# Altium schematic symbol library TIA_LT1793.SchLib: 12 symbols
Pins are listed as number, name and electrical type; pins without a type are passive.

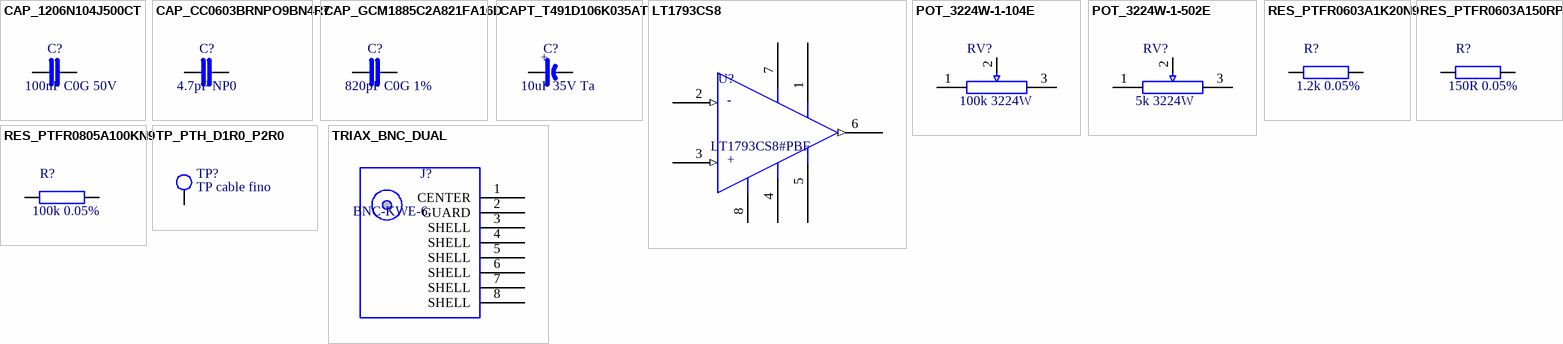
[diagram p0: symbols CAP_1206N104J500CT to TRIAX_BNC_DUAL]

## CAP_1206N104J500CT
designator C?, comment 100nF C0G 50V
Condensador 100 nF +-5 % C0G 50 V 1206 (C_HP1, C_HP2, C_DEC_*); Manufacturer: Walsin; Manufacturer Part Number: 1206N104J500CT; LCSC: C170182; Footprint Ref: C1206_IPC
footprint C1206_IPC (Footprint C1206_IPC (TIA_LT1793.PcbLib))
pins: 1, 2

## CAP_CC0603BRNPO9BN4R7
designator C?, comment 4.7pF NP0
Condensador 4.7 pF +-0.1 pF NP0 0603 (C_F); Manufacturer: YAGEO; Manufacturer Part Number: CC0603BRNPO9BN4R7; LCSC: C327022; Footprint Ref: C0603_IPC
footprint C0603_IPC (Footprint C0603_IPC (TIA_LT1793.PcbLib))
pins: 1, 2

## CAP_GCM1885C2A821FA16D
designator C?, comment 820pF C0G 1%
Condensador 820 pF +-1 % C0G 100 V 0603 (C_LP); Manufacturer: Murata; Manufacturer Part Number: GCM1885C2A821FA16D; LCSC: C1864286; Footprint Ref: C0603_IPC
footprint C0603_IPC (Footprint C0603_IPC (TIA_LT1793.PcbLib))
pins: 1, 2

## CAPT_T491D106K035AT
designator C?, comment 10uF 35V Ta
Condensador tantalo 10 uF 35 V caso D, polarizado: pin 1 = + (anodo); Manufacturer: KEMET; Manufacturer Part Number: T491D106K035AT; LCSC: C122299; Footprint Ref: CAPT_KEMET_D_7343-31
footprint CAPT_KEMET_D_7343-31 (Footprint CAPT_KEMET_D_7343-31 (TIA_LT1793.PcbLib))
pins: 1 +, 2 -

## LT1793CS8
designator U?, comment LT1793CS8#PBF
Amplificador operacional JFET bajo ruido LT1793, SO-8; Manufacturer: Analog Devices (Linear Technology); Manufacturer Part Number: LT1793CS8#PBF; LCSC: C665301; Footprint Ref: SOIC127P600X175-8N
footprint SOIC127P600X175-8N (Footprint SOIC127P600X175-8N (TIA_LT1793.PcbLib))
pins: 1 VOS, 2 -IN (in), 3 +IN (in), 4 V- (power), 5 VOS, 6 OUT (out), 7 V+ (power), 8 NC
text: -; +

## POT_3224W-1-104E
designator RV?, comment 100k 3224W
Trimmer 100 kOhm 12 vueltas Bourns 3224W (P_HP); Manufacturer Part Number: 3224W-1-104E; Pinout: 1=extremo CCW (senal), 2=cursor, 3=extremo CW (libre); Manufacturer: Bourns; LCSC: C53229; Footprint Ref: BOURNS_3224W
footprint BOURNS_3224W (Footprint BOURNS_3224W (TIA_LT1793.PcbLib))
pins: 1, 2 W, 3

## POT_3224W-1-502E
designator RV?, comment 5k 3224W
Trimmer 5 kOhm 12 vueltas Bourns 3224W (P_LP); Manufacturer Part Number: 3224W-1-502E; Pinout: 1=extremo CCW (senal), 2=cursor, 3=extremo CW (libre); Manufacturer: Bourns; LCSC: C81349; Footprint Ref: BOURNS_3224W
footprint BOURNS_3224W (Footprint BOURNS_3224W (TIA_LT1793.PcbLib))
pins: 1, 2 W, 3

## RES_PTFR0603A1K20N9
designator R?, comment 1.2k 0.05%
Resistencia 1.2 kOhm +-0.05 % 0603 (R_HP); Manufacturer: Resi; Manufacturer Part Number: PTFR0603A1K20N9; LCSC: C47115537; Footprint Ref: R0603_IPC
footprint R0603_IPC (Footprint R0603_IPC (TIA_LT1793.PcbLib))
pins: 1, 2

## RES_PTFR0603A150RP9
designator R?, comment 150R 0.05%
Resistencia 150 Ohm +-0.05 % 0603 (R_LP); Manufacturer: Resi; Manufacturer Part Number: PTFR0603A150RP9; LCSC: C19683979; Footprint Ref: R0603_IPC
footprint R0603_IPC (Footprint R0603_IPC (TIA_LT1793.PcbLib))
pins: 1, 2

## RES_PTFR0805A100KN9
designator R?, comment 100k 0.05%
Resistencia 100 kOhm +-0.05 % 0805 (R_F); Manufacturer: Resi; Manufacturer Part Number: PTFR0805A100KN9; LCSC: C19679999; Footprint Ref: R0805_IPC
footprint R0805_IPC (Footprint R0805_IPC (TIA_LT1793.PcbLib))
pins: 1, 2

## TP_PTH_D1R0_P2R0
designator TP?, comment TP cable fino  (no BOM)
Punto de test pasante metalizado para cable fino (taladro 1.0 mm, pad 2.0 mm). Sin componente de compra: excluido de BOM; Taladro: 1.0 mm metalizado; Pad: 2.0 mm redondo, mascara abierta ambas caras, sin pasta; Compra: No (pad de PCB; Standard No BOM); Footprint Ref: TP_PTH_D1R0_P2R0
footprint TP_PTH_D1R0_P2R0
pins: 1 TP

## TRIAX_BNC_DUAL
designator J?, comment BNC-KWE-6
BNC hembra acodado 50 Ohm cntitle BNC-KWE-6 en huella doble BNC/triaxial; Alt: Trompeter/Cinch CBBJR79 (triaxial) en la misma huella; Manufacturer: cntitle; Manufacturer Part Number: BNC-KWE-6; LCSC: C20415789; Footprint Ref: TRIAX_BNC_DUAL
footprint TRIAX_BNC_DUAL (Footprint TRIAX_BNC_DUAL (TIA_LT1793.PcbLib))
pins: 1 CENTER, 2 GUARD, 3 SHELL, 4 SHELL, 5 SHELL, 6 SHELL, 7 SHELL, 8 SHELL